# Altium footprint library conn.PcbLib: 101 footprints (part 6 of 7)
Each footprint in its own frame and in the unit in brackets; x right, y up, seen from the top. Pads: shape width x height; smd on the part's side, far side on the other; paste and mask are expansions set on the pad; w line width, h text height; cw(c..) or ccw(c..) is an arc to the next point about the centre after c.
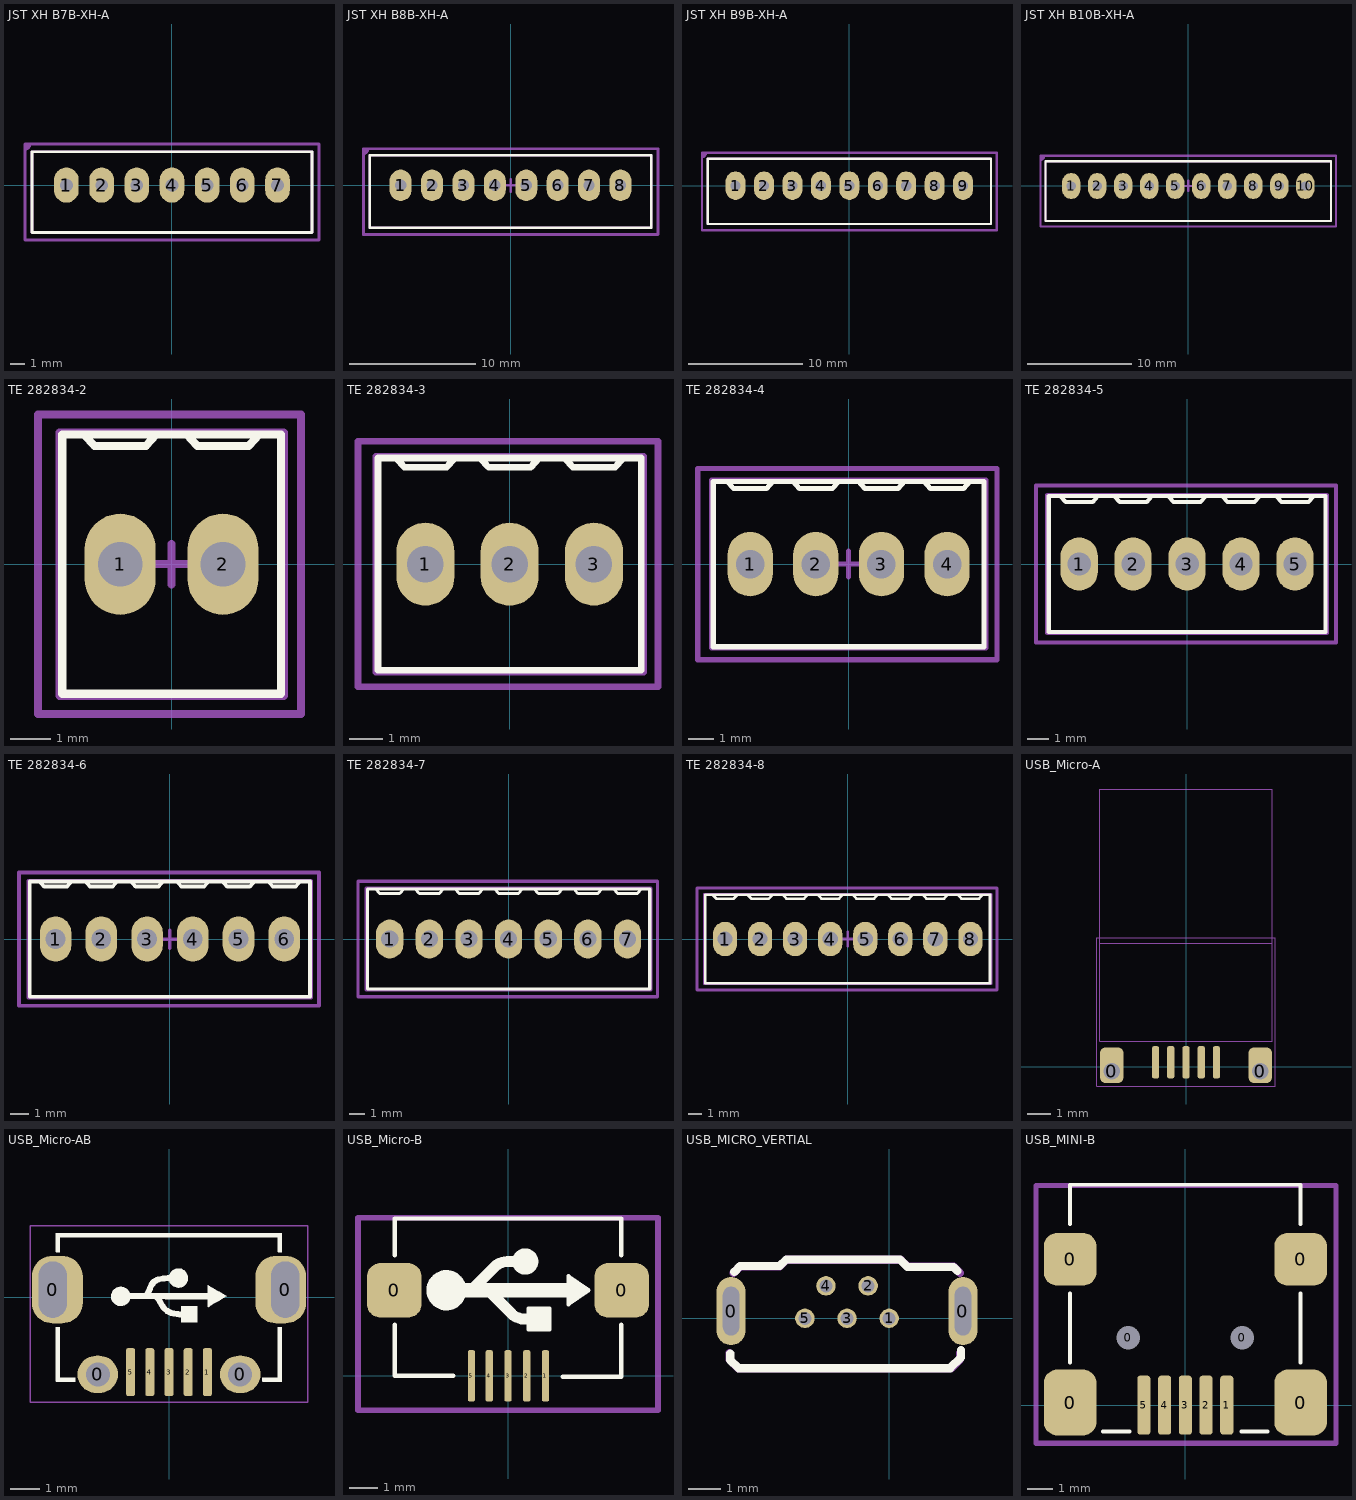
[diagram p5: the footprints below, top view; thin cyan lines are the x and y axes]

## JST XH B7B-XH-A [mm]
height 7
pads (7):
  oval 1.75x2.5 hole 0.9: 1(-7.5,0) 2(-5,0) 3(-2.5,0) 4(0,0) 5(2.5,0) 6(5,0) 7(7.5,0)
Top Overlay:
  lines w0.2: -9.95,-3.375 -9.95,2.375 9.95,2.375 9.95,-3.375 -9.95,-3.375
Mechanical 1:
  lines w0.2: -9.95,-3.375 9.95,-3.375 9.95,2.375 -9.95,2.375 -9.95,-3.375
Top Component:
  region: -10.439,2.921 -10.439,2.483 -10.356,2.483 -10.305,2.534 -10.222,2.534 -10.045,2.712 -10.045,2.802 -10.008,2.839 -10.008,2.921
  lines w0.051: -10.439,2.49 ccw(c-10.439,2.921) -10.008,2.921
  lines w0.203: -10.439,-3.886 10.439,-3.886 10.439,2.921 -10.439,2.921 -10.439,-3.886
  text ".Designator" at -0.813,-0.61 h2.03
Component Center:
  lines w0.2: -0.5,0 0.5,0 ; 0,-0.5 0,0.5 ; -10.45,-3.9 -10.45,2.9 10.45,2.9 10.45,-3.9 -10.45,-3.9
3D body "JST B7B-XH-A.STEP": height 7, standoff -3.4, extent -9.95,-3.375 9.95,2.375

## JST XH B8B-XH-A [mm]
height 7
pads (8):
  oval 1.75x2.5 hole 0.9: 1(-8.75,0) 2(-6.25,0) 3(-3.75,0) 4(-1.25,0) 5(1.25,0) 6(3.75,0) 7(6.25,0) 8(8.75,0)
Top Overlay:
  lines w0.2: -11.2,-3.375 11.2,-3.375 11.2,2.375 -11.2,2.375 -11.2,-3.375
Mechanical 1:
  lines w0.2: -11.2,-3.375 -11.2,2.375 11.2,2.375 11.2,-3.375 -11.2,-3.375
Top Component:
  region: -11.709,2.896 -11.709,2.458 -11.626,2.458 -11.575,2.509 -11.492,2.509 -11.315,2.686 -11.315,2.777 -11.278,2.813 -11.278,2.896
  lines w0.051: -11.709,2.464 ccw(c-11.709,2.896) -11.278,2.896
  lines w0.203: -11.709,-3.912 11.735,-3.912 11.735,2.896 -11.709,2.896 -11.709,-3.912
  text ".Designator" at -0.813,-0.559 h2.03
Component Center:
  lines w0.2: -0.5,0 0.5,0 ; 0,-0.5 0,0.5 ; -11.7,-3.9 -11.7,2.9 11.7,2.9 11.7,-3.9 -11.7,-3.9
3D body "JST B8B-XH-A.STEP": height 7, standoff -3.4, extent -11.2,-3.375 11.2,2.375

## JST XH B9B-XH-A [mm]
height 7
pads (9):
  oval 1.75x2.5 hole 0.9: 1(-10,0) 2(-7.5,0) 3(-5,0) 4(-2.5,0) 5(0,0) 6(2.5,0) 7(5,0) 8(7.5,0) 9(10,0)
Top Overlay:
  lines w0.2: -12.45,-3.375 12.45,-3.375 12.45,2.375 -12.45,2.375 -12.45,-3.375
Mechanical 1:
  lines w0.2: -12.45,-3.375 -12.45,2.375 12.45,2.375 12.45,-3.375 -12.45,-3.375
Top Component:
  region: -12.954,2.896 -12.954,2.458 -12.871,2.458 -12.82,2.509 -12.737,2.509 -12.559,2.686 -12.559,2.777 -12.523,2.813 -12.523,2.896
  lines w0.051: -12.954,2.464 ccw(c-12.954,2.896) -12.523,2.896
  lines w0.203: -12.954,-3.912 12.979,-3.912 12.979,2.896 -12.954,2.896 -12.954,-3.912
  text ".Designator" at -0.813,-0.559 h2.03
Component Center:
  lines w0.2: -0.5,0 0.5,0 ; 0,-0.5 0,0.5 ; -12.95,-3.9 -12.95,2.9 12.95,2.9 12.95,-3.9 -12.95,-3.9
3D body "JST B9B-XH-A.STEP": height 7, standoff -3.4, extent -12.45,-3.375 12.45,2.375

## JST XH B10B-XH-A [mm]
height 7
pads (10):
  oval 1.75x2.5 hole 0.9: 1(-11.25,0) 2(-8.75,0) 3(-6.25,0) 4(-3.75,0) 5(-1.25,0) 6(1.25,0) 7(3.75,0) 8(6.25,0) 9(8.75,0) 10(11.25,0)
Top Overlay:
  lines w0.2: -13.7,-3.375 -13.7,2.375 13.7,2.375 13.7,-3.375 -13.7,-3.375
Mechanical 1:
  lines w0.2: -13.7,-3.375 13.7,-3.375 13.7,2.375 -13.7,2.375 -13.7,-3.375
Top Component:
  region: -14.199,2.896 -14.199,2.458 -14.115,2.458 -14.064,2.509 -13.982,2.509 -13.804,2.686 -13.804,2.777 -13.767,2.813 -13.767,2.896
  lines w0.051: -14.199,2.464 ccw(c-14.199,2.896) -13.767,2.896
  lines w0.203: -14.199,-3.912 -14.199,2.896 14.199,2.896 14.199,-3.912 -14.199,-3.912
  text ".Designator" at -0.813,-0.559 h2.03
Component Center:
  lines w0.2: -0.5,0 0.5,0 ; 0,-0.5 0,0.5 ; -14.2,-3.9 14.2,-3.9 14.2,2.9 -14.2,2.9 -14.2,-3.9
3D body "JST B10B-XH-A.STEP": height 7, standoff -3.4, extent -13.7,-3.375 13.7,2.375

## TE 282834-2 [mm]
height 10
pads (2):
  oval 1.75x2.5 hole 1.1: 1(-1.27,0) 2(1.27,0)
Top Overlay:
  lines w0.2: -2.159,3.2 -1.905,2.921 -0.635,2.921 -0.381,3.2 ; 0.381,3.2 0.635,2.921 1.905,2.921 2.159,3.2 ; -2.7,-3.2 -2.7,3.2 2.7,3.2 2.7,-3.2 -2.6,-3.2 -2.7,-3.2
Mechanical 13:
  lines w0.2: -2.77,-3.25 2.77,-3.25 2.77,3.25 -2.77,3.25 -2.77,-3.25
Top Component:
  lines w0.051: -3.327,-3.658 3.2,-3.658 3.2,3.708 -3.327,3.708 -3.327,-3.658
  text ".Designator" at -0.61,-0.432 h1.52
Component Center:
  lines w0.2: -0.5,0 0.5,0 ; 0,-0.5 0,0.5 ; -3.3,-3.7 -3.3,-3.3 -3.3,3.7 3.2,3.7 3.2,-2.9 3.2,-3.7 -3.3,-3.7
3D body "TE Term Block 2port 282834-2-c-3d.STEP": height 10, standoff -3.4, extent -2.77,-3.25 2.77,3.25

## TE 282834-3 [mm]
height 10
pads (3):
  oval 1.75x2.5 hole 1.1: 1(-2.54,0) 2(0,0) 3(2.54,0)
Top Overlay:
  lines w0.2: -3.429,3.2 -3.175,2.921 -1.905,2.921 -1.651,3.2 ; -0.889,3.2 -0.635,2.921 0.635,2.921 0.889,3.2 ; 1.651,3.2 1.905,2.921 3.175,2.921 3.429,3.2 ; -3.97,-3.2 -3.87,-3.2 3.97,-3.2 3.97,3.2 -3.97,3.2 -3.97,-3.2
Mechanical 13:
  lines w0.2: -4.04,-3.25 -4.04,3.25 4.04,3.25 4.04,-3.25 -4.04,-3.25
Top Component:
  lines w0.051: -4.572,-3.658 4.445,-3.658 4.445,3.708 -4.572,3.708 -4.572,-3.658
  text ".Designator" at -0.813,-0.584 h2.03
Component Center:
  lines w0.2: -0.5,0 0.5,0 ; 0,-0.5 0,0.5 ; -4.57,-3.7 4.47,-3.7 4.47,-2.9 4.47,3.7 -4.57,3.7 -4.57,-3.3 -4.57,-3.7
3D body "TE Term Block 3port 282834-3-c-3d.STEP": height 10, standoff -3.4, extent -4.04,-3.25 4.04,3.25

## TE 282834-4 [mm]
height 10
pads (4):
  oval 1.75x2.5 hole 1.1: 1(-3.81,0) 2(-1.27,0) 3(1.27,0) 4(3.81,0)
Top Overlay:
  lines w0.2: -4.699,3.2 -4.445,2.921 -3.175,2.921 -2.921,3.2 ; -2.159,3.2 -1.905,2.921 -0.635,2.921 -0.381,3.2 ; 0.381,3.2 0.635,2.921 1.905,2.921 2.159,3.2 ; 2.921,3.2 3.175,2.921 4.445,2.921 4.699,3.2 ; -5.24,-3.2 -5.14,-3.2 5.24,-3.2 5.24,3.2 -5.24,3.2 -5.24,-3.2
Mechanical 13:
  lines w0.2: -5.31,-3.25 -5.31,3.25 5.31,3.25 5.31,-3.25 -5.31,-3.25
Top Component:
  lines w0.051: -5.867,-3.658 -5.867,3.708 5.74,3.708 5.74,-3.658 -5.867,-3.658
  text ".Designator" at -0.813,-0.559 h2.03
Component Center:
  lines w0.2: -0.5,0 0.5,0 ; 0,-0.5 0,0.5 ; -5.84,-3.7 -5.84,-3.3 -5.84,3.7 5.74,3.7 5.74,-2.9 5.74,-3.7 -5.84,-3.7
3D body "TE Term Block 4port 282834-4-c-3d.STEP": height 10, standoff -3.4, extent -5.31,-3.25 5.31,3.25

## TE 282834-5 [mm]
height 10
pads (5):
  oval 1.75x2.5 hole 1.1: 1(-5.08,0) 2(-2.54,0) 3(0,0) 4(2.54,0) 5(5.08,0)
Top Overlay:
  lines w0.2: -5.969,3.2 -5.715,2.921 -4.445,2.921 -4.191,3.2 ; -3.429,3.2 -3.175,2.921 -1.905,2.921 -1.651,3.2 ; -0.889,3.2 -0.635,2.921 0.635,2.921 0.889,3.2 ; 1.651,3.2 1.905,2.921 3.175,2.921 3.429,3.2 ; 4.191,3.2 4.445,2.921 5.715,2.921 5.969,3.2 ; -6.51,-3.2 -6.51,3.2 6.51,3.2 6.51,-3.2 -6.41,-3.2 -6.51,-3.2
Mechanical 13:
  lines w0.2: -6.58,-3.25 6.58,-3.25 6.58,3.25 -6.58,3.25 -6.58,-3.25
Top Component:
  lines w0.051: -7.112,-3.683 -7.112,3.683 6.985,3.683 6.985,-3.683 -7.112,-3.683
  text ".Designator" at -0.813,-0.533 h2.03
Component Center:
  lines w0.2: -0.5,0 0.5,0 ; 0,-0.5 0,0.5 ; -7.11,-3.7 -7.11,-3.3 -7.11,3.7 7.01,3.7 7.01,-2.9 7.01,-3.7 -7.11,-3.7
3D body "TE Term Block 5port 282834-5-c-3d.STEP": height 10, standoff -3.4, extent -6.58,-3.25 6.58,3.25

## TE 282834-6 [mm]
height 10
pads (6):
  oval 1.75x2.5 hole 1.1: 1(-6.35,0) 2(-3.81,0) 3(-1.27,0) 4(1.27,0) 5(3.81,0) 6(6.35,0)
Top Overlay:
  lines w0.2: -7.239,3.2 -6.985,2.921 -5.715,2.921 -5.461,3.2 ; -4.699,3.2 -4.445,2.921 -3.175,2.921 -2.921,3.2 ; -2.159,3.2 -1.905,2.921 -0.635,2.921 -0.381,3.2 ; 0.381,3.2 0.635,2.921 1.905,2.921 2.159,3.2 ; 2.921,3.2 3.175,2.921 4.445,2.921 4.699,3.2 ; 5.461,3.2 5.715,2.921 6.985,2.921 7.239,3.2 ; -7.78,-3.2 -7.68,-3.2 7.78,-3.2 7.78,3.2 -7.78,3.2 -7.78,-3.2
Mechanical 13:
  lines w0.2: -7.85,-3.25 -7.85,3.25 7.85,3.25 7.85,-3.25 -7.85,-3.25
Top Component:
  lines w0.051: -8.357,-3.658 8.28,-3.658 8.28,3.708 -8.357,3.708 -8.357,-3.658
  text ".Designator" at -0.813,-0.559 h2.03
Component Center:
  lines w0.2: -0.5,0 0.5,0 ; 0,-0.5 0,0.5 ; -8.38,-3.7 -8.38,-3.3 -8.38,3.7 8.28,3.7 8.28,-2.9 8.28,-3.7 -8.38,-3.7
3D body "TE Term Block 6port 282834-6-c-3d.STEP": height 10, standoff -3.4, extent -7.85,-3.25 7.85,3.25

## TE 282834-7 [mm]
height 10
pads (7):
  oval 1.75x2.5 hole 1.1: 1(-7.62,0) 2(-5.08,0) 3(-2.54,0) 4(0,0) 5(2.54,0) 6(5.08,0) 7(7.62,0)
Top Overlay:
  lines w0.2: -8.509,3.2 -8.255,2.921 -6.985,2.921 -6.731,3.2 ; -5.969,3.2 -5.715,2.921 -4.445,2.921 -4.191,3.2 ; -3.429,3.2 -3.175,2.921 -1.905,2.921 -1.651,3.2 ; -0.889,3.2 -0.635,2.921 0.635,2.921 0.889,3.2 ; 1.651,3.2 1.905,2.921 3.175,2.921 3.429,3.2 ; 4.191,3.2 4.445,2.921 5.715,2.921 5.969,3.2 ; 6.731,3.2 6.985,2.921 8.255,2.921 8.509,3.2 ; -9.05,-3.2 -8.95,-3.2 9.05,-3.2 9.05,3.2 -9.05,3.2 -9.05,-3.2
Mechanical 13:
  lines w0.2: -9.12,-3.25 -9.12,3.25 9.12,3.25 9.12,-3.25 -9.12,-3.25
Top Component:
  lines w0.051: -9.652,-3.683 9.576,-3.683 9.576,3.683 -9.652,3.683 -9.652,-3.683
  text ".Designator" at -0.813,-0.584 h2.03
Component Center:
  lines w0.2: -0.5,0 0.5,0 ; 0,-0.5 0,0.5 ; -9.65,-3.7 -9.65,-3.3 -9.65,3.7 9.55,3.7 9.55,-2.9 9.55,-3.7 -9.65,-3.7
3D body "TE Term Block 7port 282834-7-c-3d.STEP": height 10, standoff -3.4, extent -9.12,-3.25 9.12,3.25

## TE 282834-8 [mm]
height 10
pads (8):
  oval 1.75x2.5 hole 1.1: 1(-8.89,0) 2(-6.35,0) 3(-3.81,0) 4(-1.27,0) 5(1.27,0) 6(3.81,0) 7(6.35,0) 8(8.89,0)
Top Overlay:
  lines w0.2: -9.779,3.2 -9.525,2.921 -8.255,2.921 -8.001,3.2 ; -7.239,3.2 -6.985,2.921 -5.715,2.921 -5.461,3.2 ; -4.699,3.2 -4.445,2.921 -3.175,2.921 -2.921,3.2 ; -2.159,3.2 -1.905,2.921 -0.635,2.921 -0.381,3.2 ; 0.381,3.2 0.635,2.921 1.905,2.921 2.159,3.2 ; 2.921,3.2 3.175,2.921 4.445,2.921 4.699,3.2 ; 5.461,3.2 5.715,2.921 6.985,2.921 7.239,3.2 ; 8.001,3.2 8.255,2.921 9.525,2.921 9.779,3.2 ; -10.32,-3.2 -10.22,-3.2 10.32,-3.2 10.32,3.2 -10.32,3.2 -10.32,-3.2
Mechanical 13:
  lines w0.2: -10.39,-3.25 -10.39,3.25 10.39,3.25 10.39,-3.25 -10.39,-3.25
Top Component:
  lines w0.051: -10.922,-3.683 -10.922,3.683 10.82,3.683 10.82,-3.683 -10.922,-3.683
  text ".Designator" at -4.623,-0.533 h2.03
Component Center:
  lines w0.2: -0.5,0 0.5,0 ; 0,-0.5 0,0.5 ; -10.92,-3.7 -10.92,-3.3 -10.92,3.7 10.82,3.7 10.82,-2.9 10.82,-3.7 -10.92,-3.7
3D body "TE Term Block 8port 282834-8-c-3d.STEP": height 10, standoff -3.4, extent -10.39,-3.25 10.39,3.25

## USB_Micro-A [mil]
height 153.54
pads (7):
  rrect50% 40x60 hole 28 copper offset 0,10: 0(-125,-7.5) 0(125,-7.5)
  rrect50% 12x54 smd: 1(-51.18,7.5) 2(-25.59,7.5) 3(0,7.5) 4(25.59,7.5) 5(51.18,7.5)
Mechanical 13:
  lines w2: -145,207.5 145,207.5 ; -145,42.5 -145,467.5 145,467.5 145,42.5 -145,42.5
Top Component:
  lines w2: -150,-32.5 -150,217.5 150,217.5 150,-32.5 -150,-32.5
  text ".Designator" at -36,107 h80
3D body "UJ2-MIBH-4-SMT.stp": height 108.27, standoff -24.02, extent -147.64,-22.5 147.64,442.07

## USB_Micro-AB [mil]
height 153.54
pads (9):
  rrect80% 68x90 hole 37 slot 75 at 90 deg copper offset 6,0 mask+0: 0(-155,10)
  oval 54x50 hole 32 mask+0: 0(-95,-103) 0(95,-103)
  rrect80% 68x90 hole 37 slot 75 at 90 deg copper offset -6,0 mask+0: 0(155,10)
  rrect50% 12x64 smd: 1(51.18,-100) 2(25.59,-100) 3(0,-100) 4(-25.59,-100) 5(-51.18,-100)
Top Overlay:
  drawing of 24 lines, arcs and shapes, not listed
Top Component:
  lines w2: -185,-140 -185,95 185,95 185,-140 -185,-140
  text ".Designator" at -32,-22 h80
3D body "User Library-MicroUSB-B_Molex_105017-0001.STEP": height 108.07, standoff -21.85, extent -161.42,-109.33 161.42,104.45

## USB_Micro-B [mil]
height 153.54
pads (7):
  rrect50% 74.8x74.8 smd: 0(-155.51,116.84) 0(155.51,116.84)
  rrect50% 10x70 smd: 1(51.18,0) 2(25.59,0) 3(0,0) 4(-25.59,0) 5(-50,0)
Top Overlay:
  circle w35: c-84.07,117 r10
  circle w20: c23.56,156.21 r7.87
  region: 110.18,117 82.62,97.31 82.62,136.69
  region: 57.03,62.87 27.5,62.87 27.5,92.39 57.03,92.39
  lines w5: 27.5,62.87 27.5,92.39 57.03,92.39 57.03,62.87 27.5,62.87 ; 82.62,97.31 110.18,117 82.62,136.69 82.62,97.31
  lines w6: -155,69.8 -155,0 -75,0 ; -155,164.84 -155,215 155,215 155,164.84 ; 75,-1 155,-1 155,69.8
  lines w15: -52.85,114.46 -18.48,148.83 cw(c-0.65,131) -0.65,156.21 22.5,156.21 ; -24.7,114.54 4.83,85.01 ccw(c22.66,102.84) 22.66,77.63 42.5,77.63
  lines w20: -82.5,117 92.5,117
Top Component:
  lines w8: -205,-47 205,-47 205,216 -205,216 -205,-47
  text ".Designator" at -33,90 h80
3D body "Micro USB.STP": height 106.7, standoff -9.04, extent -156.58,4.51 157.59,218.29

## USB_MICRO_VERTIAL [mm]
pads (7):
  oval 0.9x2.1 hole 0.5 slot 1.5 at 90 deg: 0(-4.877,0.22) 0(2.273,0.22)
  round 0.6 hole 0.4: 1(0,0) 2(-0.65,1) 3(-1.3,0) 4(-1.95,1) 5(-2.6,0)
Top Overlay:
  lines w0.254: -4.902,-1.083 -4.902,-1.286 -4.648,-1.54 1.88,-1.54 2.21,-1.21 2.21,-0.981 ; -4.775,1.432 -4.597,1.61 -3.378,1.61 -3.175,1.813 0.33,1.813 0.559,1.584 1.981,1.584 2.108,1.457
Top Component:
  lines w0.254: -4.928,-1.067 -4.928,-1.27 -4.648,-1.549 1.905,-1.549 2.184,-1.27 2.184,-1.067 ; -4.801,1.397 -4.597,1.6 -3.404,1.6 -3.378,1.6 -3.175,1.803 0.279,1.803 0.356,1.803 0.559,1.6 1.981,1.6 2.184,1.397
3D body "User Library-Micro USB B THT vertical.step": height 6.48, standoff -1.43, extent -5.296,-1.165 2.704,1.85

## USB_MINI-B [mil]
height 153.54
pads (11):
  rrect50% 80x100 smd: 0(-175.2,3.94) 0(175.19,3.94)
  rrect50% 80x80 smd: 0(-175.2,221.69) 0(175.19,221.69)
  round 23.62 hole 35.43 unplated: 0(-86.61,102.36) 0(86.61,102.36)
  rrect50% 20x90 smd: 1(62.99,0) 2(31.5,0) 3(0,0) 4(-31.5,0) 5(-62.99,0)
Top Overlay:
  lines w6: -175,65 -175,170 ; -175,275 -175,335 175,335 175,275 ; -125,-40 -85,-40 ; 85,-40 125,-40 ; 175,65 175,170
Top Component:
  lines w8: -227,-58 -227,334 229,334 229,-58 -227,-58
  text ".Designator" at -35,145 h80
3D body "User Library-USB_mini_B.STEP": height 155.51, standoff -39.37, extent -210.63,-27.56 210.63,334.64